# Altium schematic symbol library EEHAZC1H101B.SchLib: 1 symbol
Pins are listed as number, name and electrical type; pins without a type are passive.

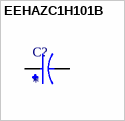
[diagram p0: symbol EEHAZC1H101B]

## EEHAZC1H101B
designator C?
CAP ALUM POLY 100UF 20% 50V T/H; MP: EEHAZC1H101B; MF: Panasonic; Package: RADIAL-2 Panasonic; Availability: In Stock; Value: *; SnapEDA_Link: https://www.snapeda.com/parts/EEHAZC1H101B/Panasonic/view-part/?ref=snap; Price: None; Check_prices: https://www.snapeda.com/parts/EEHAZC1H101B/Panasonic/view-part/?ref=eda; Purchase-URL: https://pricing.snapeda.com/search/part/EEHAZC1H101B/?ref=eda
footprint CAPPRD500W60D1000H950
pins: N, P